# Altium footprint library Footprint.PcbLib: 411 footprints (part 10 of 26)
Each footprint in its own frame and in the unit in brackets; x right, y up, seen from the top. Pads: shape width x height; smd on the part's side, far side on the other; paste and mask are expansions set on the pad; w line width, h text height; cw(c..) or ccw(c..) is an arc to the next point about the centre after c.
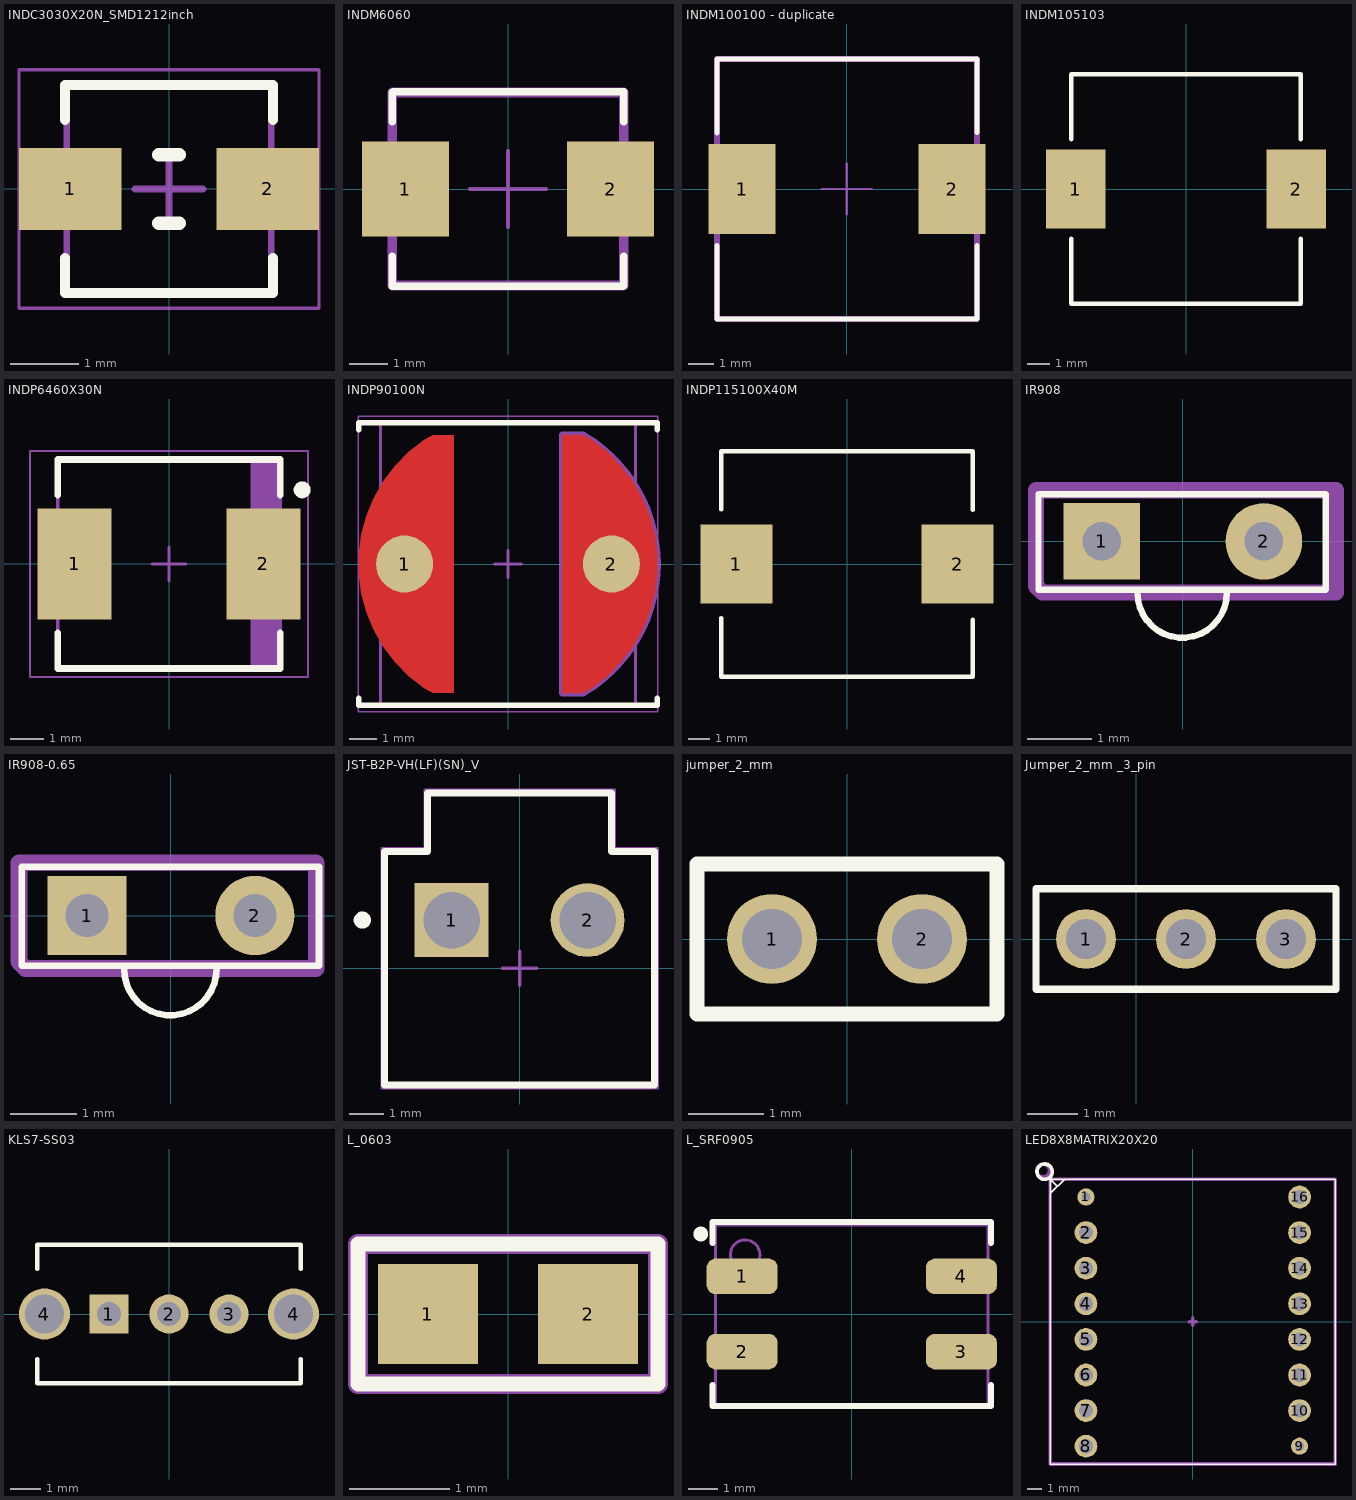
[diagram p9: the footprints below, top view; thin cyan lines are the x and y axes]

## INDC3030X20N_SMD1212inch [mm] "Chip Inductor, 2-Leads, Body 3,00x3,00mm, IPC Medium Density"
height 2
pads (2):
  rect 1.5x1.2 smd: 1(-1.45,0) 2(1.45,0)
Top Overlay:
  lines w0.15: -1.524,-1.016 -1.524,-1.524 1.524,-1.524 1.524,-1.016 ; -1.524,1.016 -1.524,1.524 1.524,1.524 1.524,1.016
  lines w0.2: -0.15,-0.5 0.15,-0.5 ; -0.15,0.5 0.15,0.5
Mechanical 13:
  lines w0.1: -1.5,-1.5 -1.5,1.5 1.5,1.5 1.5,-1.5 -1.5,-1.5
Mechanical 15:
  lines w0.05: -2.2,-1.75 -2.2,1.75 2.2,1.75 2.2,-1.75 -2.2,-1.75
  lines w0.1: -0.5,0 0.5,0 ; 0,-0.5 0,0.5
3D body "INDC3030X20N_SMD1212inch.step": height 2, standoff 0, extent -1.5,-1.5 1.5,1.5

## INDM6060 [mm] "Moulded inductor 6x6mm"
height 4
pads (2):
  rect 2.3x2.5 smd: 1(-2.7,0) 2(2.7,0)
Top Overlay:
  lines w0.2: -3.048,-1.778 -3.048,-2.565 3.023,-2.565 ; -3.048,1.778 -3.048,2.54 ; -3.023,2.565 3.048,2.565 3.048,1.778 ; 3.048,-2.54 3.048,-1.778
Mechanical 15:
  lines w0.1: -1,0 1,0 ; 0,-1 0,1
  lines w0.254: -3.048,-2.54 3.048,-2.54 3.048,2.54 -3.048,2.54 -3.048,-2.54
  text ".Designator" at -5.1,5.5 h1.52
3D body "User Library-SMDinductor.step": height 2.9, standoff 0, extent -2.95,-2.6 2.95,2.6

## INDM100100 - duplicate [mm] "Moulded inductor 10x10mm"
height 4
pads (2):
  rect 2.7x3.6 smd: 1(-4.2,0) 2(4.2,0)
Top Overlay:
  lines w0.2: -5.2,-2.25 -5.2,-5.2 -0.4,-5.2 5.2,-5.2 5.2,-2.25 ; -5.2,2.25 -5.198,5.2 ; -5.2,5.2 -0.4,5.2 5.2,5.2 5.2,2.25
Mechanical 15:
  lines w0.1: -1,0 1,0 ; 0,-1 0,1
  lines w0.254: -5.2,-5.2 -5.2,5.2 5.2,5.2 5.2,-5.2 -5.2,-5.2
  text ".Designator" at -5.1,5.5 h1.52
3D body "User Library-B82464G4.step": height 4.81, standoff 0, extent -5.2,-5.2 5.2,5.2

## INDM105103 [mm] "Moulded inductor 10x10mm"
height 4
pads (2):
  rect 2.7x3.6 smd: 1(-5,0) 2(5,0)
Top Overlay:
  lines w0.2: -5.2,-2.25 -5.2,-5.2 -0.4,-5.2 5.2,-5.2 5.2,-2.25 ; -5.2,2.25 -5.198,5.2 ; -5.2,5.2 -0.4,5.2 5.2,5.2 5.2,2.25
3D body "User Library-cdrh104r.STEP": height 4, standoff 0, extent -5.277,-5.095 5.223,5.205

## INDP6460X30N [mm] "Precision Wire Wound Inductor, 2-Leads, Body 6,40x6,00mm, IPC Medium Density"
height 3
pads (2):
  rect 2.2x3.3 smd: 1(-2.8,0) 2(2.8,0)
Top Overlay:
  circle w0.25: c3.95,2.2 r0.125
  lines w0.2: -3.3,-2.05 -3.3,-3.1 3.3,-3.1 3.3,-2.05 ; -3.3,2.05 -3.3,3.1 3.3,3.1 3.3,2.05
Assembly Top:
  rectangle: 2.412,-3.1 3.3,3.1
  lines w0.1: -3.3,-3.1 -3.3,3.1 3.3,3.1 3.3,-3.1 -3.3,-3.1
Courtyard Top:
  lines w0.05: -4.125,-3.35 -4.125,3.35 4.125,3.35 4.125,-3.35 -4.125,-3.35
  lines w0.1: -0.5,0 0.5,0 ; 0,-0.5 0,0.5
3D body "INDP6460X30N.step": height 3.1, standoff 0, extent -3.3,-3 3.3,3

## INDP90100N [mm] "Precision Wire Wound Inductor, 2-Leads, Body 9,00x10,00mm, IPC Medium Density"
height 5.5
pads (2):
  round 2.1 smd: 1(-3.81,0) 2(3.81,0)
Top Layer:
  region: 2,-4.75 2.774,-4.75 2.774,-4.749 3.084,-4.568 3.651,-4.129 4.156,-3.62 4.591,-3.049 4.949,-2.427 5.222,-1.764 5.407,-1.07 5.5,-0.359 5.5,0.358 5.407,1.07 5.222,1.763 4.949,2.427 4.592,3.049 4.157,3.619 3.651,4.129 3.084,4.568 2.774,4.749 2.774,4.75 2,4.75
  region: -2,-4.75 -2.774,-4.75 -2.774,-4.749 -3.084,-4.568 -3.651,-4.129 -4.156,-3.62 -4.591,-3.049 -4.949,-2.427 -5.222,-1.764 -5.407,-1.07 -5.5,-0.359 -5.5,0.358 -5.407,1.07 -5.222,1.763 -4.949,2.427 -4.592,3.049 -4.157,3.619 -3.651,4.129 -3.084,4.568 -2.774,4.749 -2.774,4.75 -2,4.75
Top Overlay:
  lines w0.2: -5.5,-4.95 -5.5,-5.2 5.5,-5.2 5.5,-4.95 ; -5.5,4.95 -5.5,5.2 5.5,5.2 5.5,4.95
Mechanical 3:
  lines w0.254: 2.774,-4.749 ccw(c0,0) 2.774,4.749 ; 2.774,-4.75 2,-4.75 2,4.75 2.774,4.75
Mechanical 13:
  lines w0.1: -4.7,-5.2 4.7,-5.2 4.7,5.2 -4.7,5.2 -4.7,-5.2
Mechanical 15:
  lines w0.05: -5.525,-5.45 5.525,-5.45 5.525,5.45 -5.525,5.45 -5.525,-5.45
  lines w0.1: -0.5,0 0.5,0 ; 0,-0.5 0,0.5
  text ".Designator" at -4.75,5.5 h1.52
3D body: height 2.54, standoff -2.54, extent -2.528,-2.537 2.54,2.537

## INDP115100X40M [mm] "Precision Wire Wound Inductor, 2-Leads, Body 11,50x10,00mm, IPC Low Density"
height 4
pads (2):
  rect 3.3x3.6 smd: 1(-5.05,0) 2(5.05,0)
Top Overlay:
  lines w0.2: -5.75,-2.464 -5.75,-5.15 5.75,-5.15 5.75,-2.54 ; -5.75,2.489 -5.75,5.15 5.75,5.15 5.75,2.464
3D body "74437368033.stp": height 3.8, standoff 0, extent -5.5,-5 5.5,5

## IR908 [mm]
pads (2):
  rect 1.2x1.2 hole 0.6: 1(-1.27,0)
  round 1.2 hole 0.6: 2(1.27,0)
Top Overlay:
  lines w0.1: -0.71,-0.81 ccw(c-0.01,-0.81) 0.69,-0.81 ; -2.26,-0.76 2.24,-0.76 2.24,0.74 -2.26,0.74 -2.26,-0.76
Mechanical 15:
  circle w0.254: c-1.2,0 r0.3
  lines w0.254: -2.3,-0.7 -2.2,-0.8 2.4,-0.8 2.4,0.8 -2.3,0.8 -2.3,-0.7
  text ".Designator" at -2.2,1 h1.52

## IR908-0.65 [mm]
pads (2):
  rect 1.2x1.2 hole 0.65: 1(-1.27,0)
  round 1.2 hole 0.65: 2(1.27,0)
Top Overlay:
  lines w0.1: -0.71,-0.81 ccw(c-0.01,-0.81) 0.69,-0.81 ; -2.26,-0.76 -2.26,0.74 2.24,0.74 2.24,-0.76 -2.26,-0.76
Mechanical 15:
  circle w0.254: c-1.2,0 r0.1
  lines w0.254: -2.3,-0.7 -2.2,-0.8 2.2,-0.8 2.2,0.8 -2.3,0.8 -2.3,-0.7
  text ".Designator" at -2.4,1 h1.52

## JST-B2P-VH(LF)(SN)_V [mm] "THD, 2-Leads, Body 8.5x7.86mm, Pitch 3.96mm"
height 10.9
pads (2):
  rect 2.15x2.15 hole 1.65: 1(-1.98,1.4)
  round 2.15 hole 1.65: 2(1.98,1.4)
Top Overlay:
  circle w0.25: c-4.58,1.4 r0.125
  lines w0.2: -3.93,-3.4 -3.93,3.4 -2.68,3.4 -2.68,5.1 2.68,5.1 2.68,3.4 3.93,3.4 3.93,-3.4 -3.93,-3.4
Mechanical 13:
  lines w0.1: -3.93,-3.4 -3.93,3.4 -2.68,3.4 -2.68,5.1 2.68,5.1 2.68,3.4 3.93,3.4 3.93,-3.4 -3.93,-3.4
Mechanical 15:
  lines w0.05: -4.03,-3.5 4.03,-3.5 4.03,3.5 2.78,3.5 2.78,5.2 -2.78,5.2 -2.78,3.5 -4.03,3.5 -4.03,-3.5
  lines w0.1: -0.5,0 0.5,0 ; 0,-0.5 0,0.5
3D body "User Library-B2P-VH.STEP": height 10.9, standoff -3.7, extent -3.93,-3.2 3.93,5.3

## jumper_2_mm [mm]
pads (2):
  round 1.2 hole 0.8: 1(-1,0) 2(1,0)
Top Overlay:
  lines w0.2: -2,-1 2,-1 2,1 -2,1 -2,-1
3D body "User Library-pls2-1.step": height 6.05, standoff -2.75, extent 0,-1 2,1
3D body "User Library-pls2-1.step": height 6.05, standoff -2.75, extent -2,-1 0,1

## Jumper_2_mm _3_pin [mm]
pads (3):
  round 1.2 hole 0.8: 1(-1,0) 2(1,0) 3(3,0)
Top Overlay:
  lines w0.15: -2,-1 4,-1 4,1 -2,1 -2,-1
3D body "User Library-pls2-1.step": height 6.05, standoff -2.75, extent 2,-1 4,1
3D body "User Library-pls2-1.step": height 6.05, standoff -2.75, extent 0,-1 2,1
3D body "User Library-pls2-1.step": height 6.05, standoff -2.75, extent -2,-1 0,1

## KLS7-SS03 [mm]
pads (5):
  rect 1.3x1.3 hole 0.8: 1(-2,0)
  round 1.3 hole 0.8: 2(0,0) 3(2,0)
  round 1.7 hole 1.3: 4(-4.15,0) 4(4.15,0)
Top Overlay:
  lines w0.15: -4.4,-1.5 -4.4,-2.3 ; -4.4,1.5 -4.4,2.3 4.4,2.3 4.4,1.5 ; 4.4,-1.5 4.4,-2.3 -4.4,-2.3 ; -4.4,-2.3 -4.4,-2.3
Mechanical 15:
  lines w0.254: -0.254,0 0.254,0 ; 0,-0.254 0,0.254
3D body "User Library-KLS7-SS03-12D02-EG-3.step": height 7.33, standoff -2.8, extent -4.35,-2.25 4.35,2.25

## L_0603 [mm]
height 0.8
pads (2):
  rect 1x1 smd: 1(-0.8,0) 2(0.8,0)
Top Overlay:
  lines w0.15: -1.5,-0.7 -1.5,0.7 1.5,0.7 1.5,-0.7 -1.5,-0.7
Mechanical 1:
  lines w0.2: -1.5,-0.7 1.5,-0.7 1.5,0.7 -1.5,0.7 -1.5,-0.7
3D body: height 0.89, standoff 0.01, extent -0.4,-0.4 0.4,0.4
3D body: height 0.9, standoff 0, extent 0.4,-0.4 0.8,0.4
3D body: height 0.9, standoff 0, extent -0.8,-0.4 -0.4,0.4

## L_SRF0905 [mm]
pads (4):
  rrect50% 2.4x1.2 smd mask+0.1: 1(-3.7,1.27) 2(-3.7,-1.27) 3(3.7,-1.27) 4(3.7,1.27)
Top Overlay:
  circle w0.25: c-5.1,2.7 r0.125
  lines w0.2: -4.7,-2.4 -4.7,-3.1 4.7,-3.1 4.7,-2.4 ; -4.7,2.4 -4.7,3.1 4.7,3.1 4.7,2.4
Mechanical 1:
  circle w0.1: c-3.6,2 r0.5
  lines w0.1: -4.6,-3.1 -4.6,3 4.6,3 4.6,-3.1 -4.6,-3.1
3D body "SRF0905.STEP": height 4.81, standoff 0.01, extent -4.6,-3 4.601,3

## LED8X8MATRIX20X20 [mm]
pads (16):
  round 1.2 hole 0.65: 1(-7.5,8.75) 9(7.5,-8.75)
  round 1.6 hole 1: 2(-7.5,6.25) 3(-7.5,3.75) 4(-7.5,1.25) 5(-7.5,-1.25) 6(-7.5,-3.75) 7(-7.5,-6.25) 8(-7.5,-8.75) 10(7.5,-6.25) 11(7.5,-3.75) 12(7.5,-1.25) 13(7.5,1.25) 14(7.5,3.75) 15(7.5,6.25) 16(7.5,8.75)
Top Overlay:
  circle w0.254: c-10.4,10.525 r0.54
  lines w0.1: -10,9 -9,10 ; -9.5,9.5 -10,10 ; 3.3,10 -10,10 ; 3.302,10 10,10 10,-10 -10,-10 -10,10
Mechanical 15:
  circle w0.254: c-10.5,10.6 r0.447
  lines w0.254: -0.254,0 0.254,0 ; 0,-0.254 0,0.254 ; -10,-10 10,-10 10,10 -10,10 -10,-10
  text ".Designator" at -4.8,10.3 h1.52
3D body "User Library-LED matrix 1_9mm.step": height 5.5, standoff -6.5, extent -10,-10 10,10